# Altium schematic symbol library USB 3.1 C 6PF.SchLib: 1 symbol
Pins are listed as number, name and electrical type; pins without a type are passive.

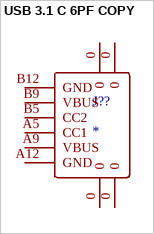
[diagram p0: symbol USB 3.1 C 6PF COPY]

## USB 3.1 C 6PF COPY
designator J??
footprint USB-C-SMD_TYPE-C-USB-13
pins: 0, 0, 0, 0, A5 CC1, A9 VBUS, A12 GND, B5 CC2, B9 VBUS, B12 GND